# Altium schematic symbol library Diodes.SchLib: 7 symbols
Pins are listed as number, name and electrical type; pins without a type are passive.

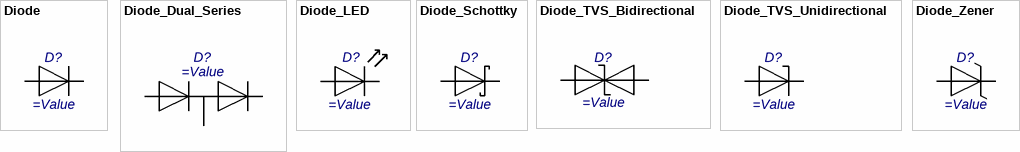
[diagram p0: symbols Diode to Diode_Zener]

## Diode
designator D?
pins: 1 A, 2 C

## Diode_Dual_Series
designator D?
pins: 1 A, 2 С, 3

## Diode_LED
designator D?
pins: 1 A, 2 C

## Diode_Schottky
designator D?
pins: 1 A, 2 C

## Diode_TVS_Bidirectional
designator D?
pins: 1, 2

## Diode_TVS_Unidirectional
designator D?
pins: 1 A, 2 C

## Diode_Zener
designator D?
pins: 1 A, 2 C